# Altium footprint library IoT_Uni_Term_PcbLib.PcbLib: 21 footprints (part 2 of 2)
Each footprint in its own frame and in the unit in brackets; x right, y up, seen from the top. Pads: shape width x height; smd on the part's side, far side on the other; paste and mask are expansions set on the pad; w line width, h text height; cw(c..) or ccw(c..) is an arc to the next point about the centre after c.
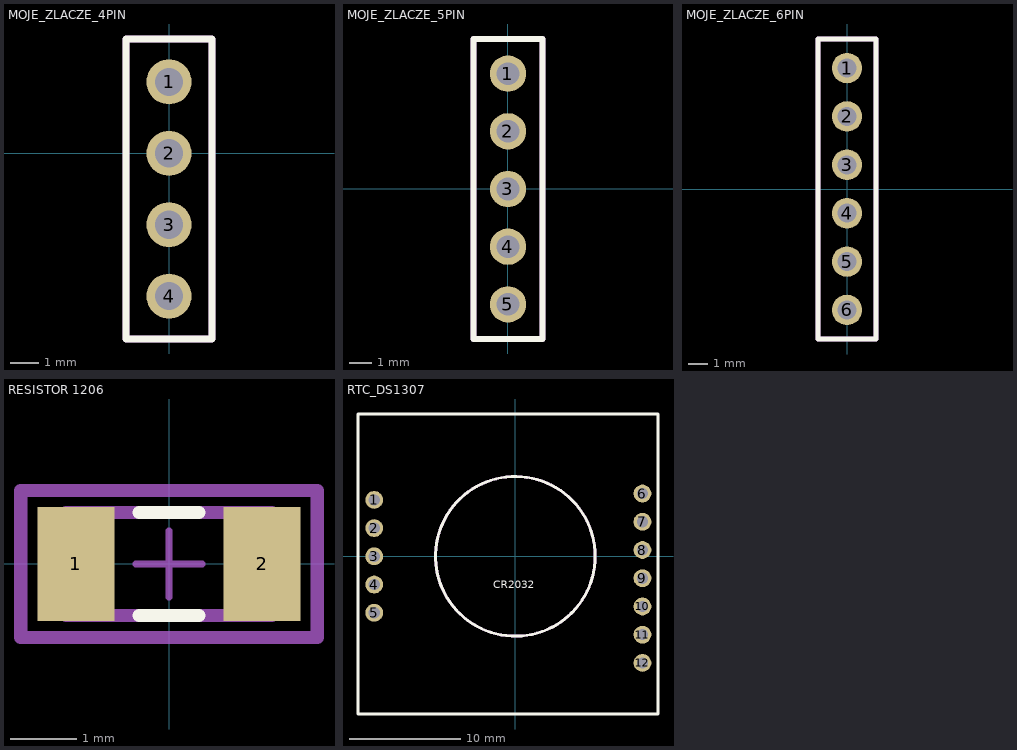
[diagram p1: the footprints below, top view; thin cyan lines are the x and y axes]

## MOJE_ZLACZE_4PIN [mm]
pads (4):
  round 1.6 hole 1: 1(0,2.54) 2(0,0) 3(0,-2.54) 4(0,-5.08)
Top Overlay:
  lines w0.254: -1.524,-6.604 -1.524,4.064 1.524,4.064 1.524,-6.604 -1.524,-6.604
Top Assembly:
  lines w0.254: -1.524,-6.604 1.524,-6.604 1.524,4.064 -1.524,4.064 -1.524,-6.604
  text ".Designator" at -3.499,-2.773 h0.7

## MOJE_ZLACZE_5PIN [mm]
pads (5):
  round 1.6 hole 1: 1(0,5.08) 2(0,2.54) 3(0,0) 4(0,-2.54) 5(0,-5.08)
Top Overlay:
  lines w0.254: -1.524,-6.604 -1.524,6.604 1.524,6.604 1.524,-6.604 -1.524,-6.604
Top Assembly:
  lines w0.254: -1.524,-6.604 -1.524,6.604 1.524,6.604 1.524,-6.604 -1.524,-6.604
  text ".Designator" at -3.499,-0.233 h0.7

## MOJE_ZLACZE_6PIN [mm]
pads (6):
  round 1.6 hole 1: 1(0,6.35) 2(0,3.81) 3(0,1.27) 4(0,-1.27) 5(0,-3.81) 6(0,-6.35)
Top Overlay:
  lines w0.254: 1.524,-5.334 1.524,7.874 -1.524,7.874 -1.524,-5.334 -1.524,-7.874 1.524,-7.874 1.524,-4.318
Top Assembly:
  lines w0.254: -1.524,-7.874 -1.524,-5.334 -1.524,7.874 1.524,7.874 1.524,-5.334 1.524,-7.874 -1.524,-7.874
  text ".Designator" at -3.499,-0.233 h0.7

## RESISTOR 1206 [mm]
pads (2):
  rect 1.156x1.71 smd paste+0 mask+0: 1(-1.401,0) 2(1.401,0)
Top Overlay:
  lines w0.2: -0.448,-0.775 0.448,-0.775 ; -0.448,0.775 0.448,0.775
Top Assembly:
  lines w0.2: -2.229,-1.105 2.229,-1.105 2.229,1.105 -2.229,1.105 -2.229,-1.105
  text ".Designator" at 0,0.188 h1
Top 3D Body:
  lines w0.2: -1.55,-0.775 1.55,-0.775 1.55,0.775 -1.55,0.775 -1.55,-0.775
Top Courtyard:
  lines w0.2: -2.229,-1.105 2.229,-1.105 2.229,1.105 -2.229,1.105 -2.229,-1.105
Top Component Center:
  lines w0.1: -0.5,0 0.5,0 ; 0,-0.5 0,0.5
3D body "Res_TE_Connectivity_CRGCQ1206F33R_eec.STEP": height 0.25, standoff 0, extent -2.229,-1.105 2.229,1.105

## RTC_DS1307 [mm]
pads (12):
  round 1.6 hole 1: 1(-12.7,5.08) 2(-12.7,2.54) 3(-12.7,0) 4(-12.7,-2.54) 5(-12.7,-5.08) 6(11.44,5.65) 7(11.44,3.11) 8(11.44,0.57) 9(11.44,-1.97) 10(11.44,-4.51) 11(11.44,-7.05) 12(11.44,-9.59)
Top Overlay:
  circle w0.254: c0,0 r7.184
  lines w0.254: -14.16,-14.19 12.84,-14.19 ; -14.16,-14.19 -14.16,12.81 ; -14.16,-14.19 12.84,-14.19 ; -14.16,-14.19 -14.16,12.81 ; -14.16,12.81 12.84,12.81 ; -14.16,12.81 12.84,12.81 ; 12.84,-14.19 12.84,12.81 ; 12.84,-14.19 12.84,12.81
  text "CR2032" at -1.983,-2.89 h0.7
Top Assembly:
  circle w0.254: c0,0 r7.184
  text ".Designator" at -3.499,-0.233 h0.7
  text "CR2032" at -1.983,-2.89 h0.7